# Altium schematic symbol library TS63410K.SchLib: 1 symbol
Pins are listed as number, name and electrical type; pins without a type are passive.

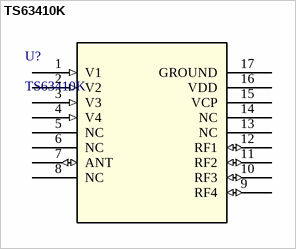
[diagram p0: symbol TS63410K]

## TS63410K
designator U?
Description; Manufacturer_Name: TagoreTech; Copyright: Copyright (C) 2026 Ultra Librarian. All rights reserved.; Manufacturer_Part_Number: TS63410K; RefDes: RefDes; Type: Type
footprint QFN16_3x3x0p8_TGT
pins: 1 V1 (in), 2 V2 (in), 3 V3 (in), 4 V4 (in), 5 NC, 6 NC, 7 ANT (io), 8 NC, 9 RF4 (io), 10 RF3 (io), 11 RF2 (io), 12 RF1 (io), 13 NC, 14 NC, 15 VCP, 16 VDD (power), 17 GROUND (power)